# Altium schematic symbol library 24V转12V芯片_URA2412S-6WR3.SCHLIB: 1 symbol
Pins are listed as number, name and electrical type; pins without a type are passive.

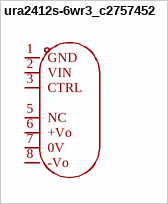
[diagram p0: symbol ura2412s-6wr3_c2757452]

## ura2412s-6wr3_c2757452
designator U??  (value not drawn)
特性：超宽4:1输入电压范围。 高效率达85%。 空载功耗低至0.24W。 I/O隔离测试电压1.5kV DC。 输入欠压保护，输出短路、过流保护。 工作环境温度范围：-40℃至+85℃。应用：医疗保健。 工业控制; Manufacturer: MORNSUN(金升阳); AddInBom: yes; ModelId: 59ee18447e164eb5803ce5c0826121e9; ModelName: PWRM-TH_URAXXXXS-6WR3; ModelTransform: 866.14,374.015,0,0,0,0,0,-81.299,-161.417; Number of Outputs: 2; Output Power: 6W; Voltage - Supply: 9V~36V; Conversion Efficiency: 83%; Output Voltage: ±12V; Output Current(Max): 250mA; Capacitive Load(Max): 120uF; Isolation Voltage(Vrms): 1.5kV; Value: 500kHz; Ripple Noise: 120mVp-p; Symbol: URA2412S-6WR3_C2757452; LCSC Part Name: 9V~36V ±12V 250mA 6W; SupplierPart: C2757452; ManufacturerPart: URA2412S-6WR3; Supplier Footprint: SIP,22x9.5mm; JLCPCB Part Class: Extended Part; Datasheet: https://item.szlcsc.com/datasheet/URA2412S-6WR3/2873721.html; Supplier: LCSC; ConvertToPcb: yes; FootprintName: PWRM-TH_URAXXXXS-6WR3; Type: -; Features: 欠压保护；短路保护；过流保护；轻载高效模式; Operating Temperature: -40℃~+85℃; Quiescent Supply Current: -; Length: 22mm; Width: 9.5mm; Height: 12mm; Voltage Regulation: -
footprint PWRM-TH_URAXXXXS-6WR3
pins: 1 GND, 2 VIN, 3 CTRL, 5 NC, 6 +Vo, 7 0V, 8 -Vo